# EAGLE library part TC1508A (library C3_SCOUT_REVC)
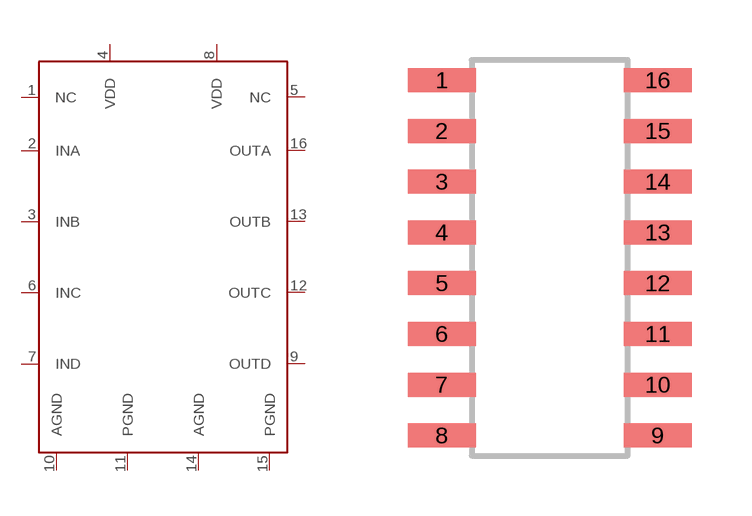
[diagram p4: symbol with the pads of SOIC16-1.27; footprint SOIC16-1.27]

Designator prefix U

## TC1508A  [SOIC16-1.27]
1  NC  nc
2  INA  in
3  INB  in
4  VDD  pwr
5  NC  nc
6  INC  in
7  IND  in
8  VDD  pwr
9  OUTD  out
10  AGND  pwr
11  PGND  pwr
12  OUTC  out
13  OUTB  out
14  AGND  pwr
15  PGND  pwr
16  OUTA  out

## Footprint SOIC16-1.27 (pad centres in mm)
smd 1.7 x 0.6: 1 -2.7,4.445; 2 -2.7,3.175; 3 -2.7,1.905; 4 -2.7,0.635; 5 -2.7,-0.635; 6 -2.7,-1.905; 7 -2.7,-3.175; 8 -2.7,-4.445; 9 2.7,-4.445; 10 2.7,-3.175; 11 2.7,-1.905; 12 2.7,-0.635; 13 2.7,0.635; 14 2.7,1.905; 15 2.7,3.175; 16 2.7,4.445